# Altium schematic symbol library Regulator.SchLib: 250 symbols (part 4 of 6)
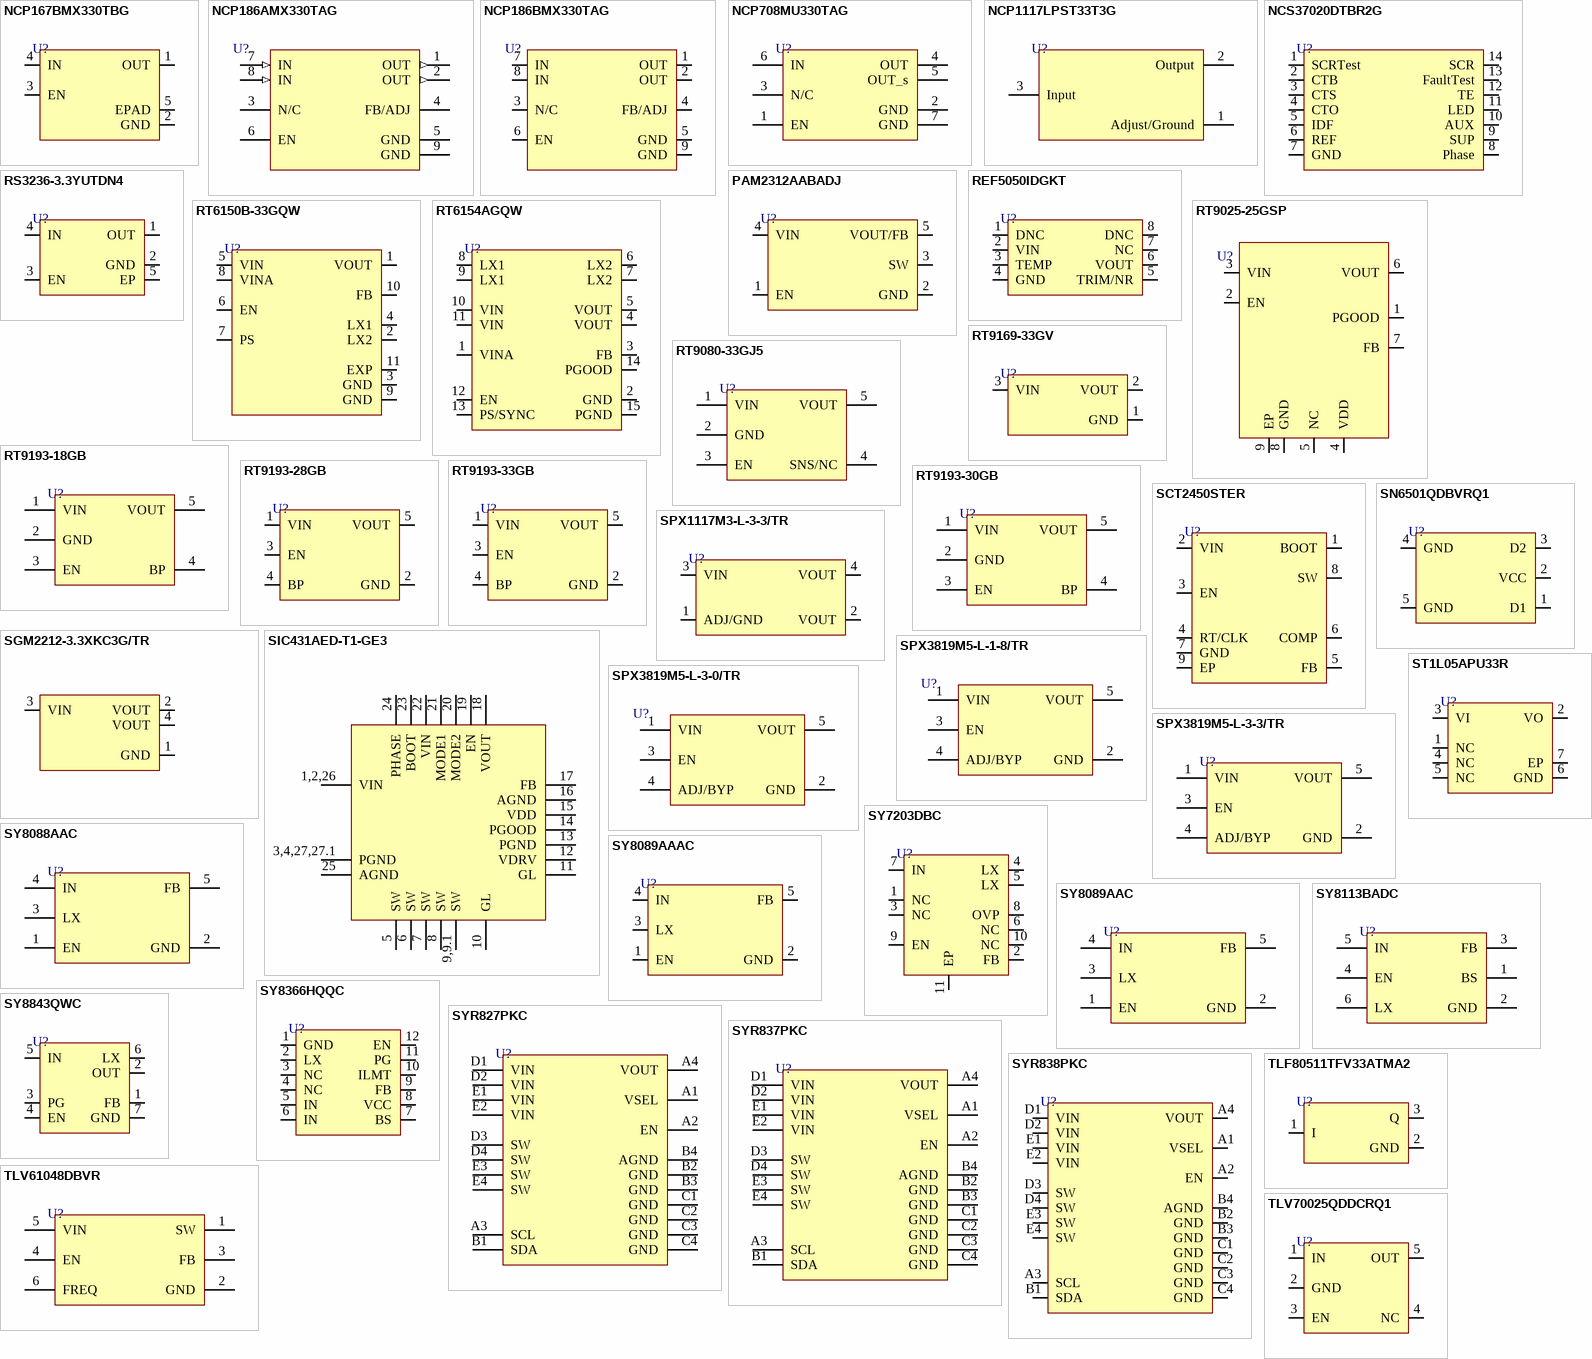
[diagram p9: symbols NCP167BMX330TBG to TLV70025QDDCRQ1]

## NCP167BMX330TBG
designator U?
IC REG LINEAR 3.3V 700MA 4XDFN; Manufacturer: ON Semiconductor; Manufacturer Part Number: NCP167BMX330TBG; Supplier: Future Electronics; Supplier Part Number: 4107897; RoHS: Yes; Item Type: IC; Stock: 5000; Pricing: 5000=0.184, 10000=0.178 (USD); ComponentLink1URL: http://www.farnell.com/datasheets/2711391.pdf?src-supplier=Farnell; ComponentLink1Description: http://www.farnell.com/datasheets/2711391.pdf?src-supplier=Farnell; ComponentLink2URL: http://www.farnell.com/datasheets/2711391.pdf?src-supplier=Newark; ComponentLink2Description: http://www.farnell.com/datasheets/2711391.pdf?src-supplier=Newark; ComponentLink3URL: https://www.onsemi.com/pub/Collateral/NCP167-D.PDF?src-supplier=Digikey; ComponentLink3Description: https://www.onsemi.com/pub/Collateral/NCP167-D.PDF?src-supplier=Digikey; ComponentLink4URL: https://datasheet.octopart.com/NCP167BMX330TBG-ON-Semiconductor-datasheet-138898180.pdf?src-supplier=Future+Electronics; ComponentLink4Description: https://datasheet.octopart.com/NCP167BMX330TBG-ON-Semiconductor-datasheet-138898180.pdf?src-supplier=Future+Electronics; ComponentLink5URL: https://datasheet.octopart.com/NCP167BMX330TBG-ON-Semiconductor-datasheet-138887418.pdf?src-supplier=TME; ComponentLink5Description: https://datasheet.octopart.com/NCP167BMX330TBG-ON-Semiconductor-datasheet-138887418.pdf?src-supplier=TME
footprint 4-UDFN (1.0x1.0)
pins: 1 OUT, 2 GND, 3 EN, 4 IN, 5 EPAD

## NCP186AMX330TAG
designator U?
IC REG LINEAR 3.3V 1A 8XDFN; Manufacturer: ON Semiconductor; Manufacturer Part Number: NCP186AMX330TAG; Dropout Voltage: 95mV; Number of Regulators: 1; Min Current Limit: 1.1A; Supplier 1: Digi-Key; Stock 1: 5995; Pricing 1: 1=0.48, 10=0.39, 25=0.3564, 100=0.2405, 250=0.199, 500=0.18242, 1000=0.13682 (USD); Mount: Surface Mount; Number of Pins: 8; Min Operating Temperature: -40°C; Max Operating Temperature: 125°C; Packaging: Tape and Reel; Output Voltage: 3.3V; Output Current: 1A; Lead Free: Lead Free; ComponentLink1URL: http://www.farnell.com/datasheets/2236905.pdf?src-supplier=Farnell; ComponentLink1Description: http://www.farnell.com/datasheets/2236905.pdf?src-supplier=Farnell; ComponentLink2URL: http://www.farnell.com/datasheets/2236905.pdf?src-supplier=Newark; ComponentLink2Description: http://www.farnell.com/datasheets/2236905.pdf?src-supplier=Newark; ComponentLink3URL: http://www.onsemi.com/pub/Collateral/NCP186-D.PDF?src-supplier=Digi-Key; ComponentLink3Description: http://www.onsemi.com/pub/Collateral/NCP186-D.PDF?src-supplier=Digi-Key; ComponentLink4URL: https://www.onsemi.com/pub/Collateral/NCP186-D.PDF?src-supplier=Digi-Key; ComponentLink4Description: https://www.onsemi.com/pub/Collateral/NCP186-D.PDF?src-supplier=Digi-Key; Supplier Part Number 1: NCP186AMX330TAGOSCT-ND; LCSC Part Number: C719823; Item Type: IC
footprint 8-XDFN (1.6x1.2)
pins: 1 OUT (out), 2 OUT (out), 3 N/C, 4 FB/ADJ, 5 GND (power), 6 EN, 7 IN (in), 8 IN (in), 9 GND (power)

## NCP186BMX330TAG
designator U?
IC REG LINEAR 3.3V 1A 8XDFN; Manufacturer: ON Semiconductor; Manufacturer Part Number: NCP186BMX330TAG; Dropout Voltage: 95mV; Number of Regulators: 1; Min Current Limit: 1.1A; Output Type: Fixed; Output Configuration: Positive; Max Supply Voltage: 5.5V; Quiescent Current: 140uA; Power Supply Rejection Ratio (PSRR): 75dB; Supplier: Digi-Key; Supplier Part Number: NCP186BMX330TAGOSCT-ND; RoHS: Yes; Category: Voltage Regulators - Linear; Stock: 9; Pricing: 1=0.49, 10=0.421, 25=0.3928, 100=0.2917, 250=0.24688, 500=0.23564, 1000=0.17393, 2500=0.1627 (USD); Mounting Technology: Surface Mount; Min Operating Temperature: -40°C; Max Operating Temperature: 125°C; Packaging: Tape and Reel; Output Voltage: 3.3V; Output Current: 1A; Series: -; Min Output Voltage: 3.3V; Lead Free: Lead Free; RoHS Compliant: Yes; ComponentLink1URL: http://www.mouser.com/ds/2/308/NCP186-D-968152.pdf?src-supplier=Mouser; ComponentLink1Description: http://www.mouser.com/ds/2/308/NCP186-D-968152.pdf?src-supplier=Mouser; ComponentLink2URL: http://www.onsemi.com/pub/Collateral/NCP186-D.PDF?src-supplier=Digi-Key; ComponentLink2Description: http://www.onsemi.com/pub/Collateral/NCP186-D.PDF?src-supplier=Digi-Key; LCSC Part Number: C603677; Item Type: IC
footprint 8-XDFN (1.6x1.2)
pins: 1 OUT, 2 OUT, 3 N/C, 4 FB/ADJ, 5 GND, 6 EN, 7 IN, 8 IN, 9 GND

## NCP708MU330TAG
designator U?
IC REG LINEAR 3.3V 1A 6UDFN; Manufacturer: ON Semiconductor; Manufacturer Part Number: NCP708MU330TAG; Dropout Voltage: 220mV; Number of Regulators: 1; Min Current Limit: 1.1A; Supplier 1: Digi-Key; RoHS: Yes; Category: Voltage Regulators - Linear; Stock 1: 3000; Pricing 1: 1=0.51000, 10=0.43500, 25=0.40600, 100=0.32470, 250=0.30152, 500=0.25512, 1000=0.19714 (USD); Mount: Surface Mount; Min Operating Temperature: -40°C; Max Operating Temperature: 125°C; Packaging: Tape and Reel; Output Voltage: 3.3V; Output Current: 1A; Lead Free: Lead Free; RoHS Compliant: Yes; ComponentLink1URL: http://www.mouser.com/ds/2/308/NCP708-D-1082570.pdf?src-supplier=Mouser; ComponentLink1Description: http://www.mouser.com/ds/2/308/NCP708-D-1082570.pdf?src-supplier=Mouser; ComponentLink2URL: http://www.onsemi.com/pub/Collateral/NCP708-D.PDF?src-supplier=Digi-Key; ComponentLink2Description: http://www.onsemi.com/pub/Collateral/NCP708-D.PDF?src-supplier=Digi-Key; Supplier Part Number 1: NCP708MU330TAGOSCT-ND; LCSC Part Number: C183178; Item Type: IC
footprint 6-UDFN (3x3)
pins: 1 EN, 2 GND, 3 N/C, 4 OUT, 5 OUT_s, 6 IN, 7 GND

## NCP1117LPST33T3G
designator U?
IC REG LINEAR 3.3V 1A SOT223; Manufacturer: ON Semiconductor; Manufacturer Part Number: NCP1117LPST33T3G; Dropout Voltage: 1.3V; Number of Outputs: 1; Min Input Voltage: -300mV; Max Input Voltage: 18V; Min Current Limit: 1.1A; Quiescent Current: 700uA; Reference Voltage: 1.275V; Polarity: Positive; Power Supply Rejection Ratio (PSRR): 60dB; Output Type: Fixed; Supplier 1: Digi-Key; RoHS: Yes; Category: Voltage Regulators - Linear; Stock 1: 2017; Pricing 1: 1=0.44000, 10=0.37400, 25=0.34920, 100=0.27930, 250=0.25932, 500=0.21944, 1000=0.16957 (USD); Mount: Surface Mount; Case/Package: SOT-223; Number of Pins: 3; Contact Plating: Tin,Matte; Min Operating Temperature: 0°C; Max Operating Temperature: 125°C; Packaging: Tape and Reel; Output Voltage: 3.3V; Package Quantity: 1; Max Output Current: 1A; Output Current: 1A; Number of Regulators: 1; Min Output Voltage: 3.3V; Nominal Output Voltage: 3.3V; Series: -; Length: 6.7mm; Width: 3.7mm; Height: 1.69mm; REACH SVHC: No SVHC; Lead Free: Lead Free; Halogen Free: Halogen Free; RoHS Compliant: Yes; ComponentLink1URL: https://datasheet.ciiva.com/6590/ncp1117lp-d-6590870.pdf?src-supplier=Digi-Key; ComponentLink1Description: https://datasheet.ciiva.com/6590/ncp1117lp-d-6590870.pdf?src-supplier=Digi-Key; ComponentLink2URL: https://datasheet.ciiva.com/16468/ncp1117lp-d-16468566.pdf?src-supplier=Future+Electronics; ComponentLink2Description: https://datasheet.ciiva.com/16468/ncp1117lp-d-16468566.pdf?src-supplier=Future+Electronics; ComponentLink3URL: https://datasheet.ciiva.com/6590/ncp1117lp-d-6590872.pdf?src-supplier=Digi-Key; ComponentLink3Description: https://datasheet.ciiva.com/6590/ncp1117lp-d-6590872.pdf?src-supplier=Digi-Key; ComponentLink4URL: https://datasheet.ciiva.com/6590/ncp1117lp-d-6590873.pdf?src-supplier=Digi-Key; ComponentLink4Description: https://datasheet.ciiva.com/6590/ncp1117lp-d-6590873.pdf?src-supplier=Digi-Key; ComponentLink5URL: https://datasheet.ciiva.com/8233/ncp1117lp-d-8233561.pdf?src-supplier=Avnet; ComponentLink5Description: https://datasheet.ciiva.com/8233/ncp1117lp-d-8233561.pdf?src-supplier=Avnet; ComponentLink6URL: https://datasheet.ciiva.com/8231/ncp1117lp-d-8231034.pdf?src-supplier=Avnet; ComponentLink6Description: https://datasheet.ciiva.com/8231/ncp1117lp-d-8231034.pdf?src-supplier=Avnet; ComponentLink7URL: https://datasheet.ciiva.com/4887/ncp1117lp-d-82673-4887580.pdf?src-supplier=Mouser; ComponentLink7Description: https://datasheet.ciiva.com/4887/ncp1117lp-d-82673-4887580.pdf?src-supplier=Mouser; Supplier Part Number 1: NCP1117LPST33T3GOSCT-ND; LCSC Part Number: C146799; Item Type: IC
footprint SOT- 223
pins: 1 Adjust/Ground, 2 Output, 3 Input

## NCS37020DTBR2G
designator U?
IC SIGNAL PROCESSOR 14TSSOP; Manufacturer: onsemi; Manufacturer Part Number: NCS37020DTBR2G; Manufacturer Lifecycle Status: ACTIVE; Item Type: Sensor and Detector Interfaces; Max Supply Current: 10mA; Max Supply Voltage: 13V; Operating Supply Voltage: 12V; Supplier: DigiKey; LCSC Part Number: C904570; RoHS: Compliant; Stock: 2623; Pricing: 1=0.99, 10=0.713, 25=0.6436, 100=0.5668, 250=0.53028, 500=0.50824, 1000=0.4901 (USD); China RoHS: Compliant; Height - Seated (Max): 1.2mm; Length: 5mm; Lifecycle Status: Production; Max Operating Temperature: 70°C; Min Operating Temperature: 0°C; Number of Terminals: 14; REACH SVHC: Yes; Terminal Pitch: 650µm; Width: 4.4mm; ComponentLink1URL: https://datasheet.octopart.com:443/NCS37020DTBR2G-onsemi-datasheet-180965843.pdf?src-supplier=IHS; ComponentLink1Description: https://datasheet.octopart.com:443/NCS37020DTBR2G-onsemi-datasheet-180965843.pdf?src-supplier=IHS; ComponentLink2URL: https://datasheet.octopart.com:443/NCS37020DTBR2G-ON-Semiconductor-datasheet-139012421.pdf?src-supplier=Master+Electronics; ComponentLink2Description: https://datasheet.octopart.com:443/NCS37020DTBR2G-ON-Semiconductor-datasheet-139012421.pdf?src-supplier=Master+Electronics; ComponentLink3URL: https://datasheet.octopart.com:443/NCS37020DTBR2G-ON-Semiconductor-datasheet-137129895.pdf?src-supplier=onsemi; ComponentLink3Description: https://datasheet.octopart.com:443/NCS37020DTBR2G-ON-Semiconductor-datasheet-137129895.pdf?src-supplier=onsemi; ComponentLink4URL: http://sigma.octopart.com:80/reach_statement/ON-Semiconductor-company-79.pdf?src-supplier=Compliance+Statements; ComponentLink4Description: http://sigma.octopart.com:80/reach_statement/ON-Semiconductor-company-79.pdf?src-supplier=Compliance+Statements; ComponentLink5URL: https://octopart.com:443/opatz8j6/c1?t=ZQW9HMtH4k71rWyV6AJY4tuW3XheiTOPmjmobTXB_F26sMcwWMhmH10pq7sQJYBRXfGSHYWRpmqpvFarTcJ6IR5mJHNE_a9wC_wytZDRLioJeZ7QsJAeRfWIGI1BjBRFqUYimvJtzLjCjz17RDpSBx7XSL-tIesgpAoA9dkWd1QvjggH5Lf3PglFk8Jmj008jqbUnKitEB1RpbYA_80My9UupV7zL5uwbriqM9u8ka-eDVP0HHlgEyvlk90TkPkxt1apKx9jOG4F6f6WcXkBfOtrxuHJ_x8hryS4-VTjD0u0BN_yaFUAv4LE__5U5qDUiotF1QbODTNZ71WeSvwhQDdPzE4qpMHglnhuqzT235XeMYg&src-supplier=Compliance+Statements; ComponentLink5Description: https://octopart.com:443/opatz8j6/c1?t=ZQW9HMtH4k71rWyV6AJY4tuW3XheiTOPmjmobTXB_F26sMcwWMhmH10pq7sQJYBRXfGSHYWRpmqpvFarTcJ6IR5mJHNE_a9wC_wytZDRLioJeZ7QsJAeRfWIGI1BjBRFqUYimvJtzLjCjz17RDpSBx7XSL-tIesgpAoA9dkWd1QvjggH5Lf3PglFk8Jmj008jqbUnKitEB1RpbYA_80My9UupV7zL5uwbriqM9u8ka-eDVP0HHlgEyvlk90TkPkxt1apKx9jOG4F6f6WcXkBfOtrxuHJ_x8hryS4-VTjD0u0BN_yaFUAv4LE__5U5qDUiotF1QbODTNZ71WeSvwhQDdPzE4qpMHglnhuqzT235XeMYg&src-supplier=Compliance+Statements; ComponentLink6URL: https://octopart.com:443/opatz8j6/c1?t=HismN954h6fGmh9fmuQcgXhTaW1LIpJi1zfdE4ekLkTpZNiJX5OuPT8uhS35awRxYVrPSlueGbHyRXMTAgi5oFyNekVsRZ8Wf8rZ0DBuUfKFuVTFVFD9ObD5jmIONxQZYnS7ApbkheX8jjM_HLR7wXao3cq_nbkOSh1zihM_Cb25b-mOFKzO57l-cPraBIcXhIIoS2L5CzwghySSn828_I70UIOuSkvLkmcdjxM7wbVRBzaqQtktMNEHz6OXR8jKrzYQQpbeYqdyN6vjnc-d046VHgn1wFMO-_Mp3x6HmAFm7wxh74XFnntKtcXzz-IGW-eRo0i-X4dDM8t3zvT-QSalQbhBf0_OjmbV5ssDUWXnLg&src-supplier=Compliance+Statements; ComponentLink6Description: https://octopart.com:443/opatz8j6/c1?t=HismN954h6fGmh9fmuQcgXhTaW1LIpJi1zfdE4ekLkTpZNiJX5OuPT8uhS35awRxYVrPSlueGbHyRXMTAgi5oFyNekVsRZ8Wf8rZ0DBuUfKFuVTFVFD9ObD5jmIONxQZYnS7ApbkheX8jjM_HLR7wXao3cq_nbkOSh1zihM_Cb25b-mOFKzO57l-cPraBIcXhIIoS2L5CzwghySSn828_I70UIOuSkvLkmcdjxM7wbVRBzaqQtktMNEHz6OXR8jKrzYQQpbeYqdyN6vjnc-d046VHgn1wFMO-_Mp3x6HmAFm7wxh74XFnntKtcXzz-IGW-eRo0i-X4dDM8t3zvT-QSalQbhBf0_OjmbV5ssDUWXnLg&src-supplier=Compliance+Statements
footprint 14-TSSOP
pins: 1 SCRTest, 2 CTB, 3 CTS, 4 CTO, 5 IDF, 6 REF, 7 GND, 8 Phase, 9 SUP, 10 AUX, 11 LED, 12 TE, 13 FaultTest, 14 SCR

## PAM2312AABADJ
designator U?
IC REG BUCK ADJ 1A SYNC SOT25; Manufacturer: Diodes; Manufacturer Part Number: PAM2312AABADJ; Supplier: Digikey; LCSC Part Number: C157537; RoHS: Yes; Item Type: IC; Stock: 10405; Pricing: 1=0.52, 10=0.424, 25=0.388, 100=0.2886, 250=0.26156, 500=0.21646, 1000=0.16235 (USD); ComponentLink1URL: https://datasheet.ciiva.com/25651/pam2312-25651235.pdf?src-supplier=Digikey; ComponentLink1Description: https://datasheet.ciiva.com/25651/pam2312-25651235.pdf?src-supplier=Digikey; ComponentLink2URL: https://datasheet.ciiva.com/29731/pam2312-29731333.pdf?src-supplier=Digikey; ComponentLink2Description: https://datasheet.ciiva.com/29731/pam2312-29731333.pdf?src-supplier=Digikey; ComponentLink3URL: https://datasheet.ciiva.com/29731/pam2312-29731338.pdf?src-supplier=Digikey; ComponentLink3Description: https://datasheet.ciiva.com/29731/pam2312-29731338.pdf?src-supplier=Digikey; ComponentLink4URL: https://datasheet.ciiva.com/30032/pam2312-30032043.pdf?src-supplier=Avnet; ComponentLink4Description: https://datasheet.ciiva.com/30032/pam2312-30032043.pdf?src-supplier=Avnet
footprint SOT-23-5
pins: 1 EN, 2 GND, 3 SW, 4 VIN, 5 VOUT/FB

## REF5050IDGKT
designator U?
IC VREF SERIES 0.05% 8VSSOP; Manufacturer: Texas Instruments; Manufacturer Part Number: REF5050IDGKT; Supplier: Mouser; LCSC Part Number: C2156540; RoHS: Yes; Item Type: IC; Stock: 701; Pricing: 1=7.97, 10=6.18, 50=5.73, 100=5.23, 1000=4.86, 10000=4.86 (USD); ComponentLink1URL: https://datasheet.ciiva.com/22666/1885920-22666106.pdf?src-supplier=Element14; ComponentLink1Description: https://datasheet.ciiva.com/22666/1885920-22666106.pdf?src-supplier=Element14; ComponentLink2URL: https://datasheet.ciiva.com/2007/ref5020-2007552.pdf?src-supplier=Digikey; ComponentLink2Description: https://datasheet.ciiva.com/2007/ref5020-2007552.pdf?src-supplier=Digikey; ComponentLink3URL: https://datasheet.ciiva.com/2007/ref5020-2007553.pdf?src-supplier=Digikey; ComponentLink3Description: https://datasheet.ciiva.com/2007/ref5020-2007553.pdf?src-supplier=Digikey; ComponentLink4URL: https://datasheet.ciiva.com/2007/ref5020-2007554.pdf?src-supplier=Digikey; ComponentLink4Description: https://datasheet.ciiva.com/2007/ref5020-2007554.pdf?src-supplier=Digikey; ComponentLink5URL: https://datasheet.ciiva.com/14197/ref5050-14197087.pdf?src-supplier=Avnet; ComponentLink5Description: https://datasheet.ciiva.com/14197/ref5050-14197087.pdf?src-supplier=Avnet
footprint VSSOP-8-0.65mm
pins: 1 DNC, 2 VIN, 3 TEMP, 4 GND, 5 TRIM/NR, 6 VOUT, 7 NC, 8 DNC

## RS3236-3.3YUTDN4
designator U?
500mA 70dB@(1kHz) Fixed 3.3V Positive electrode 7.5V XDFN-4-EP(1x1) Voltage Regulators - Linear, Low Drop Out (LDO) Regulators ROHS; Manufacturer: RUNIC Technology; Manufacturer Part Number: RS3236-3.3YUTDN4; Item Type: IC; Supplier: LCSC; LCSC Part Number: C379350; RoHS: No
footprint XDFN-4-EP(1x1)
pins: 1 OUT, 2 GND, 3 EN, 4 IN, 5 EP

## RT6150B-33GQW
designator U?
IC REG BCK-BST 3.3V 800MA 10WDFN; Manufacturer: Richtek; Manufacturer Part Number: RT6150B-33GQW; Supplier: Digikey; Supplier Part Number: RT6150B-33GQWCT-ND; RoHS: Yes; Item Type: IC; Stock: 5107; Pricing: 1=1.95, 10=1.748, 25=1.6488, 100=1.4048, 250=1.31904, 500=1.15418 (USD); ComponentLink1URL: https://www.richtek.com/assets/product_file/RT6150A=RT6150B/DS6150AB-05.pdf?src-supplier=Digikey; ComponentLink1Description: https://www.richtek.com/assets/product_file/RT6150A=RT6150B/DS6150AB-05.pdf?src-supplier=Digikey; ComponentLink2URL: https://datasheet.octopart.com/RT6150B-33GQW-Richtek-datasheet-82510503.pdf?src-supplier=Farnell; ComponentLink2Description: https://datasheet.octopart.com/RT6150B-33GQW-Richtek-datasheet-82510503.pdf?src-supplier=Farnell; ComponentLink3URL: https://datasheet.octopart.com/RT6150B-33GQW-Richtek-datasheet-160668463.pdf?src-supplier=SHENGYU+ELECTRONICS; ComponentLink3Description: https://datasheet.octopart.com/RT6150B-33GQW-Richtek-datasheet-160668463.pdf?src-supplier=SHENGYU+ELECTRONICS
footprint 10-WDFN (2.5x2.5)
pins: 1 VOUT, 2 LX2, 3 GND, 4 LX1, 5 VIN, 6 EN, 7 PS, 8 VINA, 9 GND, 10 FB, 11 EXP

## RT6154AGQW
designator U?
IC REG BCK BST ADJ 4A 14WDFN; Manufacturer: Richtek; Manufacturer Part Number: RT6154AGQW; Supplier: Digi-Key; Supplier Part Number: 1028-1338-1-ND; RoHS: Yes; Category: Voltage Regulators - Switching; Stock: 7681; Pricing: 1=2.97, 10=2.668, 25=2.5176, 100=2.1448, 250=2.01392, 500=1.7622 (USD); ComponentLink1URL: http://www.farnell.com/datasheets/2045512.pdf?src-supplier=Element14; ComponentLink1Description: http://www.farnell.com/datasheets/2045512.pdf?src-supplier=Element14; ComponentLink2URL: https://www.richtek.com/assets/product_file/RT6154A=RT6154B/DS6154AB-01.pdf?src-supplier=Digi-Key; ComponentLink2Description: https://www.richtek.com/assets/product_file/RT6154A=RT6154B/DS6154AB-01.pdf?src-supplier=Digi-Key; LCSC Part Number: C250400; Item Type: IC
footprint DFN-14(3x4)
pins: 1 VINA, 2 GND, 3 FB, 4 VOUT, 5 VOUT, 6 LX2, 7 LX2, 8 LX1, 9 LX1, 10 VIN, 11 VIN, 12 EN, 13 PS/SYNC, 14 PGOOD, 15 PGND

## RT9025-25GSP
designator U?
IC REG LIN POS ADJ 2A 8SOP; Manufacturer: Richtek; Manufacturer Part Number: RT9025-25GSP; Nominal Output Voltage: 2.5V; Min Input Voltage: 1.4V; Max Supply Voltage: 5.5V; Number of Regulators: 1; Min Output Voltage: 800mV; Output Type: Fixed,Adjustable; Output Configuration: Positive; Quiescent Current: 1.2mA; Supplier: Digikey; RoHS: Yes; Item Type: IC; Mounting Technology: Surface Mount; Case/Package: SOIC; Pins: 8; Min Operating Temperature: -40°C; Max Operating Temperature: 85°C; Output Current: 2A; Max Output current: 2A; Packaging: Cut Tape; Series: -; Max Output Voltage: 5.5V; Lead Free: Lead Free; RoHS Compliant: Yes; Reach SVHC Compliant: Unknown; ComponentLink1URL: https://datasheet.ciiva.com/22749/1720526-22749465.pdf?src-supplier=Element14; ComponentLink1Description: https://datasheet.ciiva.com/22749/1720526-22749465.pdf?src-supplier=Element14
footprint 8-SO-EP_
pins: 1 PGOOD, 2 EN, 3 VIN, 4 VDD, 5 NC, 6 VOUT, 7 FB, 8 GND, 9 EP

## RT9080-33GJ5
designator U?
TSOT-23-5 Linear Voltage Regulators (LDO) ROHS; Manufacturer: Richtek Tech; Manufacturer Part Number: RT9080-33GJ5; Item Type: IC; Package: TSOT-23-5; LCSC Part Number: C841192; ComponentLink1Description: LCSC; ComponentLink1URL: https://www.lcsc.com/product-detail/Linear-Voltage-Regulators-LDO_Richtek-Tech-RT9080-33GJ5_C841192.html
footprint TSOT-23-5
pins: 1 VIN, 2 GND, 3 EN, 4 SNS/NC, 5 VOUT

## RT9169-33GV
designator U?
IC REG LINEAR 3.3V 100MA SOT23-3; Manufacturer: Richtek; Manufacturer Part Number: RT9169-33GV; Min Input Voltage: 2V; Max Supply Voltage: 6V; Number of Regulators: 1; Quiescent Current: 4uA; Dropout Voltage: 450mV; Min Current Limit: 150mA; Power Rating: 400mW; Tolerance: 2%; Supplier: Mouser; Supplier Part Number: 835-RT9169-33GV; RoHS: Yes; Category: Voltage Regulators - Linear; Stock: 2935; Pricing: 1=0.61, 10=0.501, 50=0.501, 100=0.38, 1000=0.259, 10000=0.21 (USD); Mounting Technology: Surface Mount; Case/Package: TO-236-3; Pins: 3; Min Operating Temperature: -40°C; Max Operating Temperature: 85°C; Nominal Output Voltage: 3.3V; Output Current: 100mA; Max Output current: 100mA; Packaging: Cut Tape; Series: -; Output Voltage: 3.3V; Number of Outputs: 1; Lead Free: Lead Free; Reach SVHC Compliant: Unknown; ComponentLink1URL: https://datasheet.ciiva.com/28652/1782146-28652976.pdf?src-supplier=Element14; ComponentLink1Description: https://datasheet.ciiva.com/28652/1782146-28652976.pdf?src-supplier=Element14; Item Type: IC
footprint SOT-23 (TRANS NPN 40V 0.6A SOT23)
pins: 1 GND, 2 VOUT, 3 VIN

## RT9193-18GB
designator U?
IC REG LDO 1.8V 0.3A SOT23-5; Manufacturer: Richtek; Manufacturer Part Number: RT9193-18GB; Min Input Voltage: 2.5V; Max Input Voltage: 5.5V; Output Current: 300mA; Number of Regulators: 1; Min Current Limit: 360mA; Supplier 1: Digi-Key; RoHS: Yes; Category: Voltage Regulators - Linear; Stock 1: 11875; Pricing 1: 1=0.50000, 10=0.40900, 25=0.37360, 100=0.27810, 250=0.25208, 500=0.20860, 1000=0.15646 (USD); Mount: Surface Mount; Case/Package: SOT-23-5; Number of Pins: 5; Min Operating Temperature: -40°C; Max Operating Temperature: 125°C; Nominal Output Voltage: 1.8V; Packaging: Tape and Reel; Output Voltage: 1.8V; Series: -; REACH SVHC: Unknown; Lead Free: Lead Free; RoHS Compliant: Yes; ComponentLink1URL: https://www.richtek.com/assets/product_file/RT9193/DS9193-17.pdf?src-supplier=Digi-Key; ComponentLink1Description: https://www.richtek.com/assets/product_file/RT9193/DS9193-17.pdf?src-supplier=Digi-Key; ComponentLink2URL: http://www.farnell.com/datasheets/1720535.pdf?src-supplier=Element14; ComponentLink2Description: http://www.farnell.com/datasheets/1720535.pdf?src-supplier=Element14; Supplier Part Number 1: 1028-1016-1-ND; Item Type: IC
footprint SOT-23-5
pins: 1 VIN, 2 GND, 3 EN, 4 BP, 5 VOUT

## RT9193-28GB
designator U?
IC REG LDO 2.8V 0.3A SOT23-5; Manufacturer: Richtek; Manufacturer Part Number: RT9193-28GB; Dropout Voltage: 220mV; Max Supply Voltage: 5.5V; Min Input Voltage: 2.5V; Max Output current: 300mA; Number of Regulators: 1; Min Current Limit: 360mA; Item Type: IC; LCSC Part Number: C56731; Supplier: Digikey; Supplier Part Number: 1028-1072-1-ND; RoHS: Yes; Category: Voltage Regulators - Linear; Stock: 1346; Pricing: 1=0.53, 10=0.454, 25=0.424, 100=0.3394, 250=0.31512, 500=0.26664, 1000=0.20604 (USD); Mounting Technology: Surface Mount; Case/Package: SOT-23-5; Pins: 5; Min Operating Temperature: -40°C; Max Operating Temperature: 125°C; Packaging: Cut Tape; Nominal Output Voltage: 2.8V; Output Current: 300mA; Output Voltage: 2.8V; Series: -; Lead Free: Lead Free; RoHS Compliant: Yes; Reach SVHC Compliant: Unknown; ComponentLink1URL: https://datasheet.ciiva.com/22686/1720535-22686400.pdf?src-supplier=Element14; ComponentLink1Description: https://datasheet.ciiva.com/22686/1720535-22686400.pdf?src-supplier=Element14; ComponentLink2URL: https://datasheet.ciiva.com/24157/rt9193-28gb-24157638.pdf?src-supplier=Future+Electronics; ComponentLink2Description: https://datasheet.ciiva.com/24157/rt9193-28gb-24157638.pdf?src-supplier=Future+Electronics
footprint SOT-23-5
pins: 1 VIN, 2 GND, 3 EN, 4 BP, 5 VOUT

## RT9193-30GB
designator U?
IC REG LDO 3V 0.3A SOT23-5; Manufacturer: Richtek; Manufacturer Part Number: RT9193-30GB; Dropout Voltage: 220mV; Min Input Voltage: 2.5V; Max Input Voltage: 5.5V; Output Current: 300mA; Number of Regulators: 1; Min Current Limit: 360mA; Supplier 1: Farnell; RoHS: Yes; Category: Voltage Regulators - Linear; Pricing 1: 3000=0.20900 (GBP); Mount: Surface Mount; Case/Package: SOT-23-5; Number of Pins: 5; Min Operating Temperature: -40°C; Max Operating Temperature: 125°C; Packaging: Tape and Reel; Nominal Output Voltage: 3V; Output Voltage: 3V; Series: -; REACH SVHC: Unknown; Lead Free: Lead Free; RoHS Compliant: Yes; ComponentLink1URL: https://datasheet.ciiva.com/22749/1720535-22749550.pdf?src-supplier=Element14; ComponentLink1Description: https://datasheet.ciiva.com/22749/1720535-22749550.pdf?src-supplier=Element14; Supplier Part Number 1: 2363159; Item Type: IC
footprint SOT-23-5
pins: 1 VIN, 2 GND, 3 EN, 4 BP, 5 VOUT

## RT9193-33GB
designator U?
IC REG LDO 3.3V 0.3A SOT23-5; Manufacturer: Richtek; Manufacturer Part Number: RT9193-33GB; Dropout Voltage: 220mV; Min Input Voltage: 2.5V; Max Input Voltage: 5.5V; Output Current: 300mA; Number of Regulators: 1; Min Current Limit: 360mA; Supplier 1: Digi-Key; RoHS: Yes; Category: Voltage Regulators - Linear; Stock 1: 17182; Pricing 1: 1=0.50000, 10=0.40900, 25=0.37360, 100=0.27810, 250=0.25208, 500=0.20860, 1000=0.15646 (USD); Mount: Surface Mount; Case/Package: SOT-23-5; Number of Pins: 5; Min Operating Temperature: -40°C; Max Operating Temperature: 125°C; Packaging: Tape and Reel; Nominal Output Voltage: 3.3V; Output Voltage: 3.3V; Series: -; REACH SVHC: Unknown; Lead Free: Lead Free; RoHS Compliant: Yes; ComponentLink1URL: https://datasheet.ciiva.com/2046/3d3futf-83fb3frfm5mtkzlte2lnbkzg3d3d3f3d-2046896.pdf?src-supplier=Digi-Key; ComponentLink1Description: https://datasheet.ciiva.com/2046/3d3futf-83fb3frfm5mtkzlte2lnbkzg3d3d3f3d-2046896.pdf?src-supplier=Digi-Key; ComponentLink2URL: https://datasheet.ciiva.com/28652/1782157-28652989.pdf?src-supplier=Element14; ComponentLink2Description: https://datasheet.ciiva.com/28652/1782157-28652989.pdf?src-supplier=Element14; Supplier Part Number 1: 1028-1014-1-ND; Item Type: IC; LCSC Part Number: C15651
footprint SOT-23-5
pins: 1 VIN, 2 GND, 3 EN, 4 BP, 5 VOUT

## SCT2450STER
designator U?
Step-down type 3.8V~36V 5A ESOP-8 DC-DC Converters ROHS; Manufacturer: SCT; Manufacturer Part Number: SCT2450STER; Item Type: IC; Supplier: LCSC; LCSC Part Number: C509400; RoHS: No
footprint ESOP-8
pins: 1 BOOT, 2 VIN, 3 EN, 4 RT/CLK, 5 FB, 6 COMP, 7 GND, 8 SW, 9 EP

## SGM2212-3.3XKC3G/TR
designator U?
SOT-223-3 Linear Voltage Regulators (LDO) ROHS; Manufacturer: SGMICRO; Manufacturer Part Number: SGM2212-3.3XKC3G/TR; Item Type: IC; Package: SOT-223-3; LCSC Part Number: C3294699; ComponentLink1Description: LCSC; ComponentLink1URL: https://www.lcsc.com/product-detail/Linear-Voltage-Regulators-LDO_SGMICRO-SGM2212-3-3XKC3G-TR_C3294699.html; Supplier: Avnet; Supplier Part Number: SGM2212-3.3XKC3G/TR; RoHS: No; Pricing: 2500=0.9 (USD)
footprint SOT- 223
pins: 1 GND, 2 VOUT, 3 VIN, 4 VOUT

## SIC431AED-T1-GE3
designator ?
Conv DC-DC 4.5V to 24V Synchronous Step Down Single-Out 0.6V 24A 24-Pin PowerPAK MLP EP T/R; Manufacturer: Vishay; Manufacturer Part Number: SIC431AED-T1-GE3; Output Type: Adjustable; Output Configuration: Positive; Number of Outputs: 1; Min Input Voltage: 3V; Min Output Voltage: 600mV; Max Output Voltage: 20V; Switching Frequency: 1MHz; Synchronous Rectifier: Yes; Item Type: Converter; Supplier 1: Mouser; RoHS: No; Category: Voltage Regulators - Switching; Stock 1: 56372; Pricing 1: 1=3.29000, 10=2.96000, 50=2.75000, 100=2.43000, 1000=1.99000, 10000=1.99000 (USD); Mount: Surface Mount; Number of Pins: 24; Min Operating Temperature: -40°C; Max Operating Temperature: 125°C; Packaging: Cut Tape; Max Input Voltage: 24V; Output Current: 24A; RoHS Compliant: No; ComponentLink1URL: http://www.farnell.com/datasheets/2687455.pdf?src-supplier=Farnell; ComponentLink1Description: http://www.farnell.com/datasheets/2687455.pdf?src-supplier=Farnell; ComponentLink2URL: http://www.vishay.com/docs/74589/sic431.pdf?src-supplier=Digi-Key; ComponentLink2Description: http://www.vishay.com/docs/74589/sic431.pdf?src-supplier=Digi-Key; ComponentLink3URL: http://www.vishay.com/docs/48283/_ms7327_1709.pdf?src-supplier=Digi-Key; ComponentLink3Description: http://www.vishay.com/docs/48283/_ms7327_1709.pdf?src-supplier=Digi-Key; ComponentLink4URL: http://www.farnell.com/datasheets/2687455.pdf?src-supplier=Newark; ComponentLink4Description: http://www.farnell.com/datasheets/2687455.pdf?src-supplier=Newark; ComponentLink5URL: http://www.farnell.com/datasheets/2687455.pdf?src-supplier=Element14; ComponentLink5Description: http://www.farnell.com/datasheets/2687455.pdf?src-supplier=Element14; ComponentLink6Description: LCSC; ComponentLink6URL: https://www.lcsc.com/product-detail/DC-DC-Converters_Vishay-Intertech-SIC431AED-T1-GE3_C2071422.html; LCSC Part Number: C2071422
footprint MLP44-24L(4x4)_
pins: 1,2,26 VIN, 3,4,27,27.1 PGND, 5 SW, 6 SW, 7 SW, 8 SW, 9,9.1 SW, 10 GL, 11 GL, 12 VDRV, 13 PGND, 14 PGOOD, 15 VDD, 16 AGND, 17 FB, 18 VOUT, 19 EN, 20 MODE2, 21 MODE1, 22 VIN, 23 BOOT, 24 PHASE, 25 AGND

## SN6501QDBVRQ1
designator U?
IC XFRMR DRVR NCH 350MA SOT23-5; Manufacturer: Texas Instruments; Manufacturer Part Number: SN6501QDBVRQ1; Number of Outputs: 1; Min Input Voltage: 3V; Output Voltage: 11V; Max Supply Voltage: 5.5V; Operating Supply Current: 300uA; Switching Frequency: 620kHz; Supplier: Mouser; Supplier Part Number: 595-SN6501QDBVRQ1; RoHS: Yes; Category: Voltage Regulators - Switching; Stock: 21713; Pricing: 1=2.1, 10=1.89, 50=1.89, 100=1.52, 1000=1.13, 10000=0.924 (USD); Mounting Technology: Surface Mount; Case/Package: SOT-23-5; Min Operating Temperature: -40°C; Max Operating Temperature: 125°C; Output Current: 350mA; Package Quantity: 3000; Packaging: Tape and Reel; Max Output current: 350mA; Min Supply Voltage: 3V; Series: Automotive, AEC-Q100; Radiation Hardening: No; Reach SVHC Compliant: No; Lead Free: Lead Free; RoHS Compliant: Yes; ComponentLink1URL: https://datasheet.ciiva.com/25648/sn6501-q1-25648933.pdf?src-supplier=Digikey; ComponentLink1Description: https://datasheet.ciiva.com/25648/sn6501-q1-25648933.pdf?src-supplier=Digikey; ComponentLink2URL: https://datasheet.ciiva.com/24116/sllsef3-267274-24116311.pdf?src-supplier=Mouser; ComponentLink2Description: https://datasheet.ciiva.com/24116/sllsef3-267274-24116311.pdf?src-supplier=Mouser; ComponentLink3URL: https://datasheet.ciiva.com/29590/sn6501-q1-29590029.pdf?src-supplier=Digikey; ComponentLink3Description: https://datasheet.ciiva.com/29590/sn6501-q1-29590029.pdf?src-supplier=Digikey; ComponentLink4URL: https://datasheet.ciiva.com/29590/sn6501-q1-29590030.pdf?src-supplier=Digikey; ComponentLink4Description: https://datasheet.ciiva.com/29590/sn6501-q1-29590030.pdf?src-supplier=Digikey; ComponentLink5URL: https://datasheet.ciiva.com/30031/sn6501-q1-30031541.pdf?src-supplier=Avnet; ComponentLink5Description: https://datasheet.ciiva.com/30031/sn6501-q1-30031541.pdf?src-supplier=Avnet; LCSC Part Number: C544575; Item Type: IC
footprint SOT-23-5
pins: 1 D1, 2 VCC, 3 D2, 4 GND, 5 GND

## SPX1117M3-L-3-3/TR
designator U?
IC REG LINEAR 3.3V 800MA SOT223; Manufacturer: MaxLinear; Manufacturer Part Number: SPX1117M3-L-3-3/TR; Number of Outputs: 1NUMBER; Max Supply Voltage: 20V; Nominal Supply Current: 5mA; Supplier: Digikey; LCSC Part Number: C6862; RoHS: Yes; Item Type: IC; Stock: 42701; Pricing: 1=0.68, 10=0.422, 25=0.3516, 100=0.2712, 250=0.2316, 500=0.20734, 1000=0.18707 (USD); Output Voltage: 3.3V; Number of Channels: 1NUMBER; Height: 1.8mm; ComponentLink1URL: https://datasheet.octopart.com/SPX1117M3-L-3-3-TR-MaxLinear-datasheet-11629451.pdf?src-supplier=Element14; ComponentLink1Description: https://datasheet.octopart.com/SPX1117M3-L-3-3-TR-MaxLinear-datasheet-11629451.pdf?src-supplier=Element14; ComponentLink2URL: https://www.exar.com/content/document.ashx?id=694&src-supplier=Digikey; ComponentLink2Description: https://www.exar.com/content/document.ashx?id=694&src-supplier=Digikey; ComponentLink3URL: https://datasheet.octopart.com/SPX1117M3-L-3-3-TR-MaxLinear-datasheet-133511130.pdf?src-supplier=TME; ComponentLink3Description: https://datasheet.octopart.com/SPX1117M3-L-3-3-TR-MaxLinear-datasheet-133511130.pdf?src-supplier=TME
footprint SOT- 223
pins: 1 ADJ/GND, 2 VOUT, 3 VIN, 4 VOUT

## SPX3819M5-L-1-8/TR
designator U?
LDO Voltage Regulators 500mA LOW NOISE LDO; Manufacturer: MaxLinear; Manufacturer Part Number: SPX3819M5-L-1-8/TR; Item Type: IC; Supplier 1: Mouser; RoHS: Yes; Stock 1: 19446; Pricing 1: 1=0.68000, 10=0.57700, 50=0.57700, 100=0.40000, 1000=0.26200, 10000=0.21000 (USD); RoHS Compliant: Yes; ComponentLink1URL: https://www.exar.com/content/document.ashx?id=22106&src-supplier=Digi-Key; ComponentLink1Description: https://www.exar.com/content/document.ashx?id=22106&src-supplier=Digi-Key; Supplier Part Number 1: 701-SPX3819M5-L-18TR
footprint SOT-23-5
pins: 1 VIN, 2 GND, 3 EN, 4 ADJ/BYP, 5 VOUT

## SPX3819M5-L-3-0/TR
designator U?
SPX3819 Series 3 V Fixed Output 500 mA SMT LDO Regulator - SOT-23-5; Manufacturer: MaxLinear; Manufacturer Part Number: SPX3819M5-L-3-0/TR; Max Input Voltage: 16V; Min Output Voltage: 3V; Dropout Voltage: 700mV; Output Current: 500mA; Quiescent Current: 8uA; Output Configuration: Positive; Number of Regulators: 1; Max Supply Current: 30mA; Supplier 1: Mouser; RoHS: Yes; Stock 1: 2153; Pricing 1: 1=0.68000, 10=0.57700, 50=0.57700, 100=0.40000, 1000=0.26200, 10000=0.21000 (USD); Mount: Surface Mount; Case/Package: SOT-23-5; Min Operating Temperature: -40°C; Max Operating Temperature: 125°C; Packaging: Tape and Reel; Output Type: Fixed; RoHS Compliant: Yes; ComponentLink1URL: https://www.exar.com/content/document.ashx?id=22106&src-supplier=Digi-Key; ComponentLink1Description: https://www.exar.com/content/document.ashx?id=22106&src-supplier=Digi-Key; Supplier Part Number 1: 701-SPX3819M5-L-30TR
footprint SOT-23-5
pins: 1 VIN, 2 GND, 3 EN, 4 ADJ/BYP, 5 VOUT

## SPX3819M5-L-3-3/TR
designator U?
SPX3819 Series 3.3 V 500 mA Fixed Output SMT LDO Regulator - SOT-23-5; Manufacturer: MaxLinear; Manufacturer Part Number: SPX3819M5-L-3-3/TR; Item Type: IC; Supplier 1: Newark; RoHS: Yes; Category: Voltage Regulators - Linear; RoHS Compliant: Yes; Supplier Part Number 1: 23R9703; LCSC Part Number: C9055; ComponentLink1Description: LCSC; ComponentLink1URL: https://www.lcsc.com/product-detail/Linear-Voltage-Regulators-LDO_MaxLinear-SPX3819M5-L-3-3-TR_C9055.html
footprint SOT-23-5
pins: 1 VIN, 2 GND, 3 EN, 4 ADJ/BYP, 5 VOUT

## ST1L05APU33R
designator U?
IC REG LINEAR 3.3V 1.3A 6DFN; Manufacturer: STMicroelectronics; Manufacturer Part Number: ST1L05APU33R; Supplier: Digikey; LCSC Part Number: C283488; RoHS: Yes; Item Type: IC; Stock: 7599; Pricing: 1=1.06, 10=0.766, 25=0.692, 100=0.6103, 250=0.57136, 500=0.5479, 1000=0.5286 (USD); ComponentLink1URL: https://datasheet.ciiva.com/2053/cd00186925-2053848.pdf?src-supplier=Digikey; ComponentLink1Description: https://datasheet.ciiva.com/2053/cd00186925-2053848.pdf?src-supplier=Digikey; ComponentLink2URL: https://datasheet.ciiva.com/2053/cd00186925-2053849.pdf?src-supplier=Digikey; ComponentLink2Description: https://datasheet.ciiva.com/2053/cd00186925-2053849.pdf?src-supplier=Digikey; ComponentLink3URL: https://datasheet.ciiva.com/2053/cd00186925-2053850.pdf?src-supplier=Digikey; ComponentLink3Description: https://datasheet.ciiva.com/2053/cd00186925-2053850.pdf?src-supplier=Digikey; ComponentLink4URL: https://datasheet.ciiva.com/16489/cd00186925-16489850.pdf?src-supplier=Future+Electronics; ComponentLink4Description: https://datasheet.ciiva.com/16489/cd00186925-16489850.pdf?src-supplier=Future+Electronics
footprint DFN-6(3x3)
pins: 1 NC, 2 VO (power), 3 VI (power), 4 NC, 5 NC, 6 GND (power), 7 EP (power)

## SY7203DBC
designator U?
1MHz PWM boost converter 1 DC-DCConverter 4A 2.8V~30V DFN-10-EP(3x3) LED Drivers ROHS; Manufacturer: Silergy; Manufacturer Part Number: SY7203DBC; Item Type: IC; Supplier: Avnet; Supplier Part Number: SY7203DBC; RoHS: No; Category: Uncategorized; LCSC Part Number: C125894
footprint DFN-10-EP(3x3)
pins: 1 NC, 2 FB, 3 NC, 4 LX, 5 LX, 6 NC, 7 IN, 8 OVP, 9 EN, 10 NC, 11 EP

## SY8088AAC
designator U?
Step-down type SOT-23-5 DC-DC Converters ROHS; Manufacturer: Silergy Corp; Manufacturer Part Number: SY8088AAC; Footprint: SOT-23-5; ComponentLink1Description: LCSC; ComponentLink1URL: https://www.lcsc.com/product-detail/DC-DC-Converters_Silergy-Corp-SY8088AAC_C79313.html
footprint SOT-23-5
pins: 1 EN, 2 GND, 3 LX, 4 IN, 5 FB

## SY8089AAAC
designator U?
Step-down type SOT-23-5 DC-DC Converters ROHS; Manufacturer: Silergy; Manufacturer Part Number: SY8089AAAC; Item Type: IC; Supplier 1: LCSC; RoHS: No; Supplier Part Number 1: C78988; LCSC Part Number: C78988; ComponentLink1Description: LCSC; ComponentLink1URL: https://www.lcsc.com/product-detail/DC-DC-Converters_Silergy-Corp-SY8089AAAC_C78988.html
footprint SOT-23-5
pins: 1 EN, 2 GND, 3 LX, 4 IN, 5 FB

## SY8089AAC
designator U?
High Efficiency Synchronous Step Down Regulator; Manufacturer: Silergy Corp; Manufacturer Part Number: SY8089AAC; Item Type: IC; Package: SOT-23-5; LCSC Part Number: *; ComponentLink1Description: Winsource; ComponentLink1URL: https://www.win-source.net/products/detail/silergy-corp/sy8089aac.html
footprint SOT-23-5
pins: 1 EN, 2 GND, 3 LX, 4 IN, 5 FB

## SY8113BADC
designator U?
Step-down type TSOT-23-6 DC-DC Converters ROHS; Manufacturer: Silergy; Manufacturer Part Number: SY8113BADC; Item Type: IC; Supplier 1: Avnet; RoHS: No; Category: Power Supply Modules; Supplier Part Number 1: SY8113BADC; LCSC Part Number: C78989; ComponentLink1Description: LCSC; ComponentLink1URL: https://www.lcsc.com/product-detail/DC-DC-Converters_Silergy-Corp-SY8113BADC_C78989.html
footprint TSOT-23-6
pins: 1 BS, 2 GND, 3 FB, 4 EN, 5 IN, 6 LX

## SY8366HQQC
designator U?
Step-down type QFN-12-EP(3x3) DC-DC Converters ROHS; Manufacturer: Silergy Corp; Manufacturer Part Number: SY8366HQQC; Item Type: IC; Package: QFN-12-EP(3x3); LCSC Part Number: C178253; ComponentLink1Description: LCSC; ComponentLink1URL: https://www.lcsc.com/product-detail/DC-DC-Converters_Silergy-Corp-SY8366HQQC_C178253.html
footprint (SY8366HQQC)  QFN-12-EP(3x3)
pins: 1 GND, 2 LX, 3 NC, 4 NC, 5 IN, 6 IN, 7 BS, 8 VCC, 9 FB, 10 ILMT, 11 PG, 12 EN

## SY8843QWC
designator U?
Step-down type Fixed 1.8V 2.7V~5.5V 3A QFN-7(1.5x1.5) DC-DC Converters ROHS; Manufacturer: Silergy Corp; Manufacturer Part Number: SY8843QWC; Item Type: IC; Package: QFN-7(1.5x1.5); LCSC Part Number: C3151906; ComponentLink1Description: LCSC; ComponentLink1URL: https://www.lcsc.com/product-detail/DC-DC-Converters_Silergy-Corp-SY8843QWC_C3151906.html
footprint QFN-7(1.5x1.5)
pins: 1 FB, 2 OUT, 3 PG, 4 EN, 5 IN, 6 LX, 7 GND

## SYR827PKC
designator U?
Conv DC-DC Single Step Down 2.6V 5.5V 20-Pin CSP; Manufacturer: Silergy; Manufacturer Part Number: SYR827PKC; Item Type: IC; Supplier 1: Avnet; RoHS: No; Category: Power Supply Modules; Supplier Part Number 1: SYR827PKC; LCSC Part Number: C111839; ComponentLink1Description: LCSC; ComponentLink1URL: https://www.lcsc.com/product-detail/DC-DC-Converters_Silergy-Corp-SYR827PKC_C111839.html
footprint CSP1.56*1.96-20
pins: A1 VSEL, A2 EN, A3 SCL, A4 VOUT, B1 SDA, B2 GND, B3 GND, B4 AGND, C1 GND, C2 GND, C3 GND, C4 GND, D1 VIN, D2 VIN, D3 SW, D4 SW, E1 VIN, E2 VIN, E3 SW, E4 SW

## SYR837PKC
designator U?
Step-down type CSP1.56*1.96-20 DC-DC Converters ROHS; Manufacturer: Silergy; Manufacturer Part Number: SYR837PKC; Supplier 1: Avnet; RoHS: No; RoHS Compliant: Yes; Supplier Part Number 1: SYR837PKC; LCSC Part Number: C178248; ComponentLink1Description: LCSC; ComponentLink1URL: https://www.lcsc.com/product-detail/DC-DC-Converters_Silergy-Corp-SYR837PKC_C178248.html
footprint CSP1.56*1.96-20
pins: A1 VSEL, A2 EN, A3 SCL, A4 VOUT, B1 SDA, B2 GND, B3 GND, B4 AGND, C1 GND, C2 GND, C3 GND, C4 GND, D1 VIN, D2 VIN, D3 SW, D4 SW, E1 VIN, E2 VIN, E3 SW, E4 SW

## SYR838PKC
designator U?
Step-down type CSP1.56*1.96-20 DC-DC Converters ROHS; Manufacturer: Silergy; Manufacturer Part Number: SYR838PKC; Supplier 1: Avnet; RoHS: Yes; Supplier Part Number 1: SYR838PKC; LCSC Part Number: C178249
footprint CSP1.56*1.96-20
pins: A1 VSEL, A2 EN, A3 SCL, A4 VOUT, B1 SDA, B2 GND, B3 GND, B4 AGND, C1 GND, C2 GND, C3 GND, C4 GND, D1 VIN, D2 VIN, D3 SW, D4 SW, E1 VIN, E2 VIN, E3 SW, E4 SW

## TLF80511TFV33ATMA2
designator U?
IC REG LIN 3.3V 400MA TO252-3-11; Manufacturer: Infineon; Manufacturer Part Number: TLF80511TFV33ATMA2; Supplier: Future Electronics; Supplier Part Number: 6060699; RoHS: Yes; Pricing: 2500=0.745 (USD); RoHS Compliant: Yes; Item Type: IC
footprint TO-252-2L
pins: 1 I, 2 GND, 3 Q

## TLV61048DBVR
designator U?
IC REG BOOST ADJ SOT23-6; Manufacturer: Texas Instruments; Manufacturer Part Number: TLV61048DBVR; Supplier 1: Arrow Electronics; RoHS: Yes; Category: Voltage Regulators - Switching; Stock 1: 2900; Pricing 1: 1=1.50040, 10=1.27670, 25=1.22540, 100=1.02980, 250=0.96320, 500=0.86780, 1000=0.76510 (USD); ComponentLink1URL: http://www.ti.com/general/docs/suppproductinfo.tsp?distId=10&amp;gotoUrl=http%3A%2F%2Fwww.ti.com%2Flit%2Fgpn%2Ftlv61048&src-supplier=Digi-Key; ComponentLink1Description: http://www.ti.com/general/docs/suppproductinfo.tsp?distId=10&amp;gotoUrl=http%3A%2F%2Fwww.ti.com%2Flit%2Fgpn%2Ftlv61048&src-supplier=Digi-Key; Supplier Part Number 1: TLV61048DBVR; Item Type: IC
footprint SOT-23-6
pins: 1 SW, 2 GND, 3 FB, 4 EN, 5 VIN, 6 FREQ

## TLV70025QDDCRQ1
designator U?
IC REG LINEAR 2.5V 200MA SOT23; Manufacturer: Texas Instruments; Manufacturer Part Number: TLV70025QDDCRQ1; Supplier: Mouser; LCSC Part Number: C2867307; RoHS: Yes; Item Type: IC; Stock: 2425; Pricing: 1=0.65, 10=0.41, 50=0.41, 100=0.334, 1000=0.306, 10000=0.269 (USD); ComponentLink1URL: https://datasheet.ciiva.com/29568/tlv70025-q1-29568375.pdf?src-supplier=Digikey; ComponentLink1Description: https://datasheet.ciiva.com/29568/tlv70025-q1-29568375.pdf?src-supplier=Digikey; ComponentLink2URL: https://datasheet.ciiva.com/12958/slvsa61c-120807-12958385.pdf?src-supplier=Mouser; ComponentLink2Description: https://datasheet.ciiva.com/12958/slvsa61c-120807-12958385.pdf?src-supplier=Mouser
footprint SOT-23-5
pins: 1 IN, 2 GND, 3 EN, 4 NC, 5 OUT

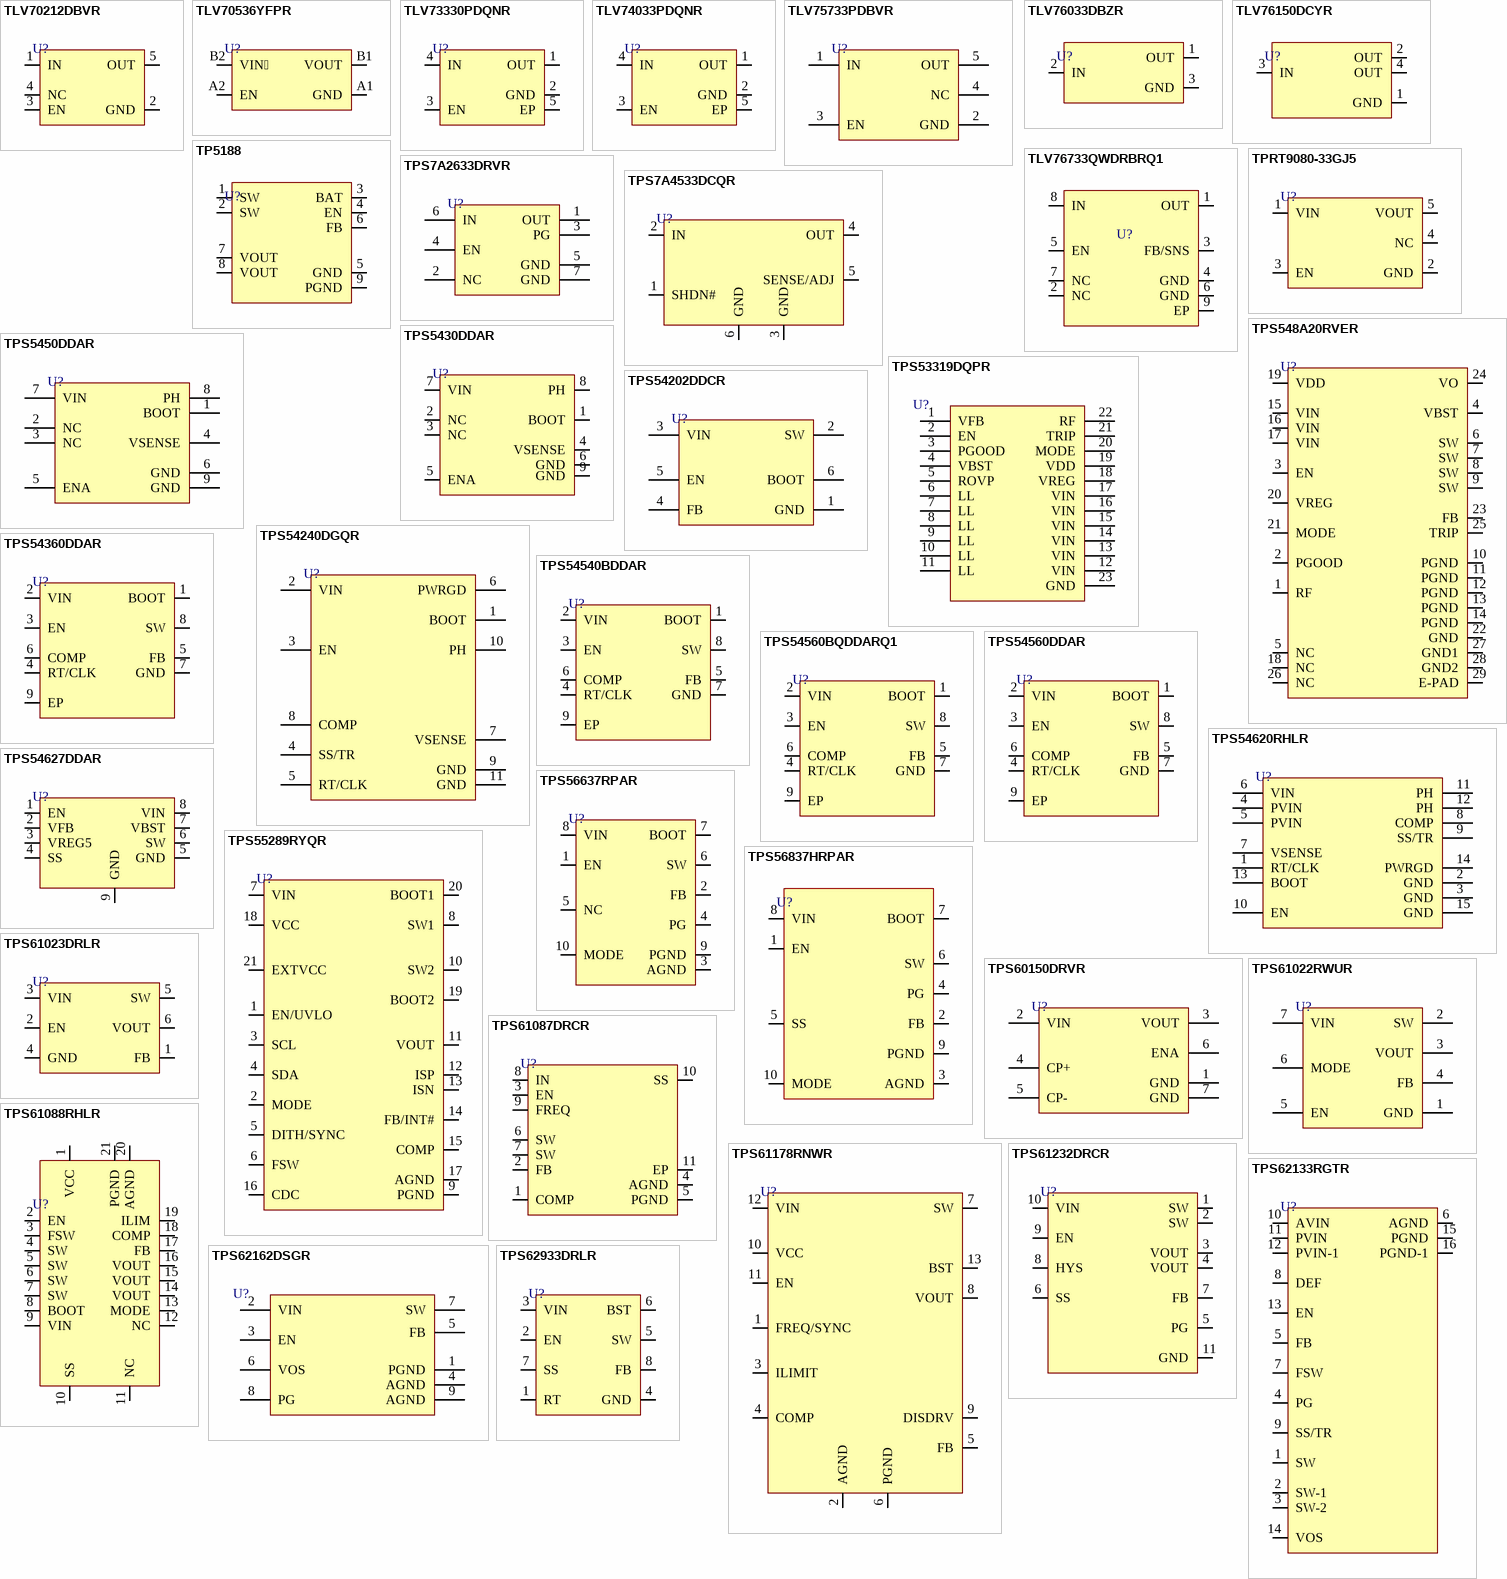
[diagram p4: symbols TLV70212DBVR to TPS62933DRLR]

## TLV70212DBVR
designator U?
IC REG LDO 1.2V 0.3A SOT23-5; Manufacturer: Texas Instruments; Manufacturer Part Number: TLV70212DBVR; Supplier: Mouser; Supplier Part Number: 595-TLV70212DBVR; RoHS: Yes; Category: Voltage Regulators - Linear; Stock: 9333; Pricing: 1=0.44, 10=0.355, 50=0.355, 100=0.237, 1000=0.178, 10000=0.099 (USD); ComponentLink1URL: https://datasheet.ciiva.com/2059/tlv702-2059899.pdf?src-supplier=Digi-Key; ComponentLink1Description: https://datasheet.ciiva.com/2059/tlv702-2059899.pdf?src-supplier=Digi-Key; ComponentLink2URL: https://datasheet.ciiva.com/2059/tlv702-2059900.pdf?src-supplier=Digi-Key; ComponentLink2Description: https://datasheet.ciiva.com/2059/tlv702-2059900.pdf?src-supplier=Digi-Key; ComponentLink3URL: https://datasheet.ciiva.com/2059/tlv702-2059901.pdf?src-supplier=Digi-Key; ComponentLink3Description: https://datasheet.ciiva.com/2059/tlv702-2059901.pdf?src-supplier=Digi-Key; LCSC Part Number: C81462; Item Type: IC
footprint SOT-23-5
pins: 1 IN, 2 GND, 3 EN, 4 NC, 5 OUT

## TLV70536YFPR
designator U?
IC REG LINEAR 3.6V 200MA 4DSBGA; Manufacturer: Texas Instruments; Manufacturer Part Number: TLV70536YFPR; Supplier: Mouser; Supplier Part Number: 595-TLV70536YFPR; RoHS: Yes; Item Type: IC; Stock: 2400; Pricing: 1=0.55, 10=0.328, 50=0.328, 100=0.256, 1000=0.231, 10000=0.19 (USD); ComponentLink1URL: http://www.ti.com/general/docs/suppproductinfo.tsp?distId=10&amp;gotoUrl=http%3A%2F%2Fwww.ti.com%2Flit%2Fgpn%2Ftlv705&src-supplier=Digikey; ComponentLink1Description: http://www.ti.com/general/docs/suppproductinfo.tsp?distId=10&amp;gotoUrl=http%3A%2F%2Fwww.ti.com%2Flit%2Fgpn%2Ftlv705&src-supplier=Digikey; ComponentLink2URL: http://www.ti.com/lit/ds/symlink/tlv705.pdf?src-supplier=Digikey; ComponentLink2Description: http://www.ti.com/lit/ds/symlink/tlv705.pdf?src-supplier=Digikey; ComponentLink3URL: http://www.ti.com/lit/ds/symlink/tlv70512.pdf?src-supplier=Digikey; ComponentLink3Description: http://www.ti.com/lit/ds/symlink/tlv70512.pdf?src-supplier=Digikey; ComponentLink4URL: http://www.ti.com/general/docs/lit/getliterature.tsp?genericPartNumber=TLV705P&&fileType=pdf&src-supplier=Avnet; ComponentLink4Description: http://www.ti.com/general/docs/lit/getliterature.tsp?genericPartNumber=TLV705P&&fileType=pdf&src-supplier=Avnet
footprint 4-DSBGA
pins: A1 GND, A2 EN, B1 VOUT, B2 VIN

## TLV73330PDQNR
designator U?
IC REG LINEAR 3V 300MA 4X2SON; Manufacturer: Texas Instruments; Manufacturer Part Number: TLV73330PDQNR; Supplier: Mouser; Supplier Part Number: 595-TLV73330PDQNR; RoHS: Yes; Category: Voltage Regulators - Linear; Stock: 14746; Pricing: 1=0.39, 10=0.255, 50=0.255, 100=0.137, 1000=0.084, 10000=0.058 (USD); ComponentLink1URL: http://www.ti.com/general/docs/suppproductinfo.tsp?distId=10&amp;gotoUrl=http%3A%2F%2Fwww.ti.com%2Flit%2Fgpn%2Ftlv733p&src-supplier=Digi-Key; ComponentLink1Description: http://www.ti.com/general/docs/suppproductinfo.tsp?distId=10&amp;gotoUrl=http%3A%2F%2Fwww.ti.com%2Flit%2Fgpn%2Ftlv733p&src-supplier=Digi-Key; LCSC Part Number: C2870830; Item Type: IC
footprint X2-SON-4(1x1)
pins: 1 OUT, 2 GND, 3 EN, 4 IN, 5 EP

## TLV74033PDQNR
designator U?
IC REG LIN 3.3V 300MA 4X2SON; Manufacturer: Texas Instruments; Manufacturer Part Number: TLV74033PDQNR; Supplier: Mouser; Supplier Part Number: 595-TLV74033PDQNR; RoHS: No; Category: Integrated Circuits (ICs); Stock: 23519; Pricing: 1=0.25, 10=0.205, 50=0.205, 100=0.096, 1000=0.049, 10000=0.033 (USD); LCSC Part Number: C3746074; Item Type: IC
footprint X2-SON-4(1x1)
pins: 1 OUT, 2 GND, 3 EN, 4 IN, 5 EP

## TLV75733PDBVR
designator U?
IC REG LINEAR 3.3V 1A SOT23-5; Manufacturer: Texas Instruments; Manufacturer Part Number: TLV75733PDBVR; Output Type: Fixed; Capacitance: 33nF; Tolerance: 20%; Voltage Rating: 50V; Output Configuration: Positive; Number of Regulators: 1; Max Input Voltage: 5.5V; Dropout Voltage: 475mV; Max Supply Current: 40uA; Power Supply Rejection Ratio (PSRR): 52dB; Supplier 1: Mouser; RoHS: Yes; Category: Voltage Regulators - Linear; Pricing 1: 1=0.68000, 10=0.58100, 50=0.58100, 100=0.40300, 500=0.34100, 1000=0.26400, 3000=0.23900, 10000=0.23900 (USD); Mount: Surface Mount; Case/Package: 1206; Min Operating Temperature: -40°C; Max Operating Temperature: 125°C; Packaging: Tape and Reel; Min Output Voltage: 3.3V; Output Current: 1A; Ratings: AEC-Q200; RoHS Compliant: Yes; ComponentLink1URL: http://www.ti.com/lit/ds/symlink/tlv757p.pdf?src-supplier=Digi-Key; ComponentLink1Description: http://www.ti.com/lit/ds/symlink/tlv757p.pdf?src-supplier=Digi-Key; Supplier Part Number 1: 595-TLV75733PDBVR; LCSC Part Number: C485517; Item Type: IC
footprint SOT-23-5
pins: 1 IN, 2 GND, 3 EN, 4 NC, 5 OUT

## TLV76033DBZR
designator U?
IC REG LINEAR 3.3V 100MA SOT23-3; Manufacturer: Texas Instruments; Manufacturer Part Number: TLV76033DBZR; Supplier: Mouser; LCSC Part Number: C2683368; RoHS: Yes; Item Type: IC; Stock: 57670; Pricing: 1=0.41, 10=0.278, 50=0.278, 100=0.132, 1000=0.101, 10000=0.083 (USD); ComponentLink1URL: http://www.ti.com/general/docs/suppproductinfo.tsp?distId=10&amp;gotoUrl=http%3A%2F%2Fwww.ti.com%2Flit%2Fgpn%2Ftlv760&src-supplier=Digikey; ComponentLink1Description: http://www.ti.com/general/docs/suppproductinfo.tsp?distId=10&amp;gotoUrl=http%3A%2F%2Fwww.ti.com%2Flit%2Fgpn%2Ftlv760&src-supplier=Digikey; ComponentLink2URL: http://www.ti.com/lit/ds/symlink/tlv760.pdf?src-supplier=Digikey; ComponentLink2Description: http://www.ti.com/lit/ds/symlink/tlv760.pdf?src-supplier=Digikey
footprint SOT-23 (TRANS NPN 40V 0.6A SOT23)
pins: 1 OUT, 2 IN, 3 GND

## TLV76150DCYR
designator U?
IC REG LINEAR 5V 1A SOT-223-4; Manufacturer: Texas Instruments; Manufacturer Part Number: TLV76150DCYR; Supplier: Mouser; LCSC Part Number: C5845194; RoHS: No; Item Type: IC; Stock: 32246; Pricing: 1=0.5, 10=0.314, 50=0.314, 100=0.253, 1000=0.231, 10000=0.167 (USD)
footprint SOT- 223
pins: 1 GND, 2 OUT, 3 IN, 4 OUT

## TLV76733QWDRBRQ1
designator U?
IC REG LIN 3.3V 1A 8SON; Manufacturer: Texas Instruments; Manufacturer Part Number: TLV76733QWDRBRQ1; Supplier: Mouser; Supplier Part Number: 595-TLV76733QWDRBRQ1; RoHS: Yes; Category: Voltage Regulators - Linear; Stock: 18312; Pricing: 1=1.43, 10=1.22, 50=1.22, 100=0.932, 1000=0.663, 10000=0.566 (USD); LCSC Part Number: C5220143; Item Type: IC
footprint 8-SON (3x3)
pins: 1 OUT, 2 NC, 3 FB/SNS, 4 GND, 5 EN, 6 GND, 7 NC, 8 IN, 9 EP

## TP5188
designator U?
Boost type Fixed 2.1A 5V 2.8V~5V ESOP-8 DC-DC Converters ROHS; Manufacturer: TPOWER; Manufacturer Part Number: TP5188; Item Type: IC; Package: ESOP-8; LCSC Part Number: C29075512; ComponentLink1Description: LCSC; ComponentLink1URL: https://www.lcsc.com/product-detail/DC-DC-Converters_TPOWER-TP5188_C29075512.html
footprint ESOP-8
pins: 1 SW, 2 SW, 3 BAT, 4 EN, 5 GND, 6 FB, 7 VOUT, 8 VOUT, 9 PGND

## TPRT9080-33GJ5
designator U?
600mA Fixed 3.3V Positive electrode 5.5V SOT-23-5 Voltage Regulators - Linear, Low Drop Out (LDO) Regulators ROHS; Manufacturer: TECH PUBLIC; Manufacturer Part Number: TPRT9080-33GJ5; Item Type: IC; Package: SOT-23-5; LCSC Part Number: C2959864; ComponentLink1Description: LCSC; ComponentLink1URL: https://www.lcsc.com/product-detail/Voltage-Regulators-Linear-Low-Drop-Out-LDO-Regulators_TECH-PUBLIC-TPRT9080-33GJ5_C2959864.html?s_z=n_TPRT9080-33GJ5
footprint SOT-23-5
pins: 1 VIN, 2 GND, 3 EN, 4 NC, 5 VOUT

## TPS7A2633DRVR
designator U?
IC REG LINEAR 3.3V 500MA 6WSON; Manufacturer: Texas Instruments; Manufacturer Part Number: TPS7A2633DRVR; Supplier 1: Digi-Key; RoHS: Yes; Category: Voltage Regulators - Linear; Pricing 1: 1=1.07000, 10=0.95400, 25=0.90520, 100=0.74360, 250=0.69508, 500=0.61428, 1000=0.48495 (USD); ComponentLink1URL: http://www.ti.com/general/docs/suppproductinfo.tsp?distId=10&amp;gotoUrl=http%3A%2F%2Fwww.ti.com%2Flit%2Fgpn%2Ftps7a26&src-supplier=Digi-Key; ComponentLink1Description: http://www.ti.com/general/docs/suppproductinfo.tsp?distId=10&amp;gotoUrl=http%3A%2F%2Fwww.ti.com%2Flit%2Fgpn%2Ftps7a26&src-supplier=Digi-Key; Supplier Part Number 1: 296-TPS7A2633DRVRCT-ND; LCSC Part Number: C2876256; Item Type: IC
footprint WSON-6(2x2)
pins: 1 OUT, 2 NC, 3 PG, 4 EN, 5 GND, 6 IN, 7 GND